# Altium schematic symbol library Components_3011.SchLib: 5 symbols
Pins are listed as number, name and electrical type; pins without a type are passive.

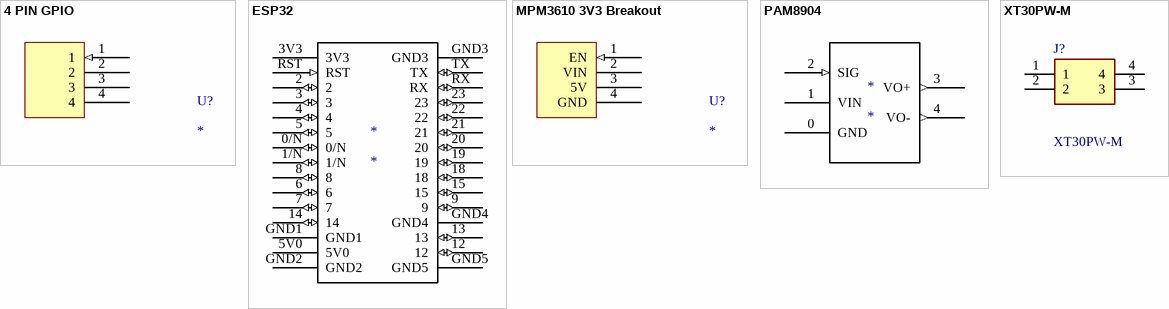
[diagram p0: symbols 4 PIN GPIO to XT30PW-M]

## 4 PIN GPIO
designator U?
footprint 4 PIN GPIO
pins: 1 (in) "EN", 2 (power) "Vin", 3 (power) "5V", 4 (power) "GND"

## ESP32
designator *
ESP32 Pinout
footprint ESP32
pins: 0/N (io), 1/N (io), 2 (io), 3 (io), 3V3, 4 (io), 5 (io), 5V0, 6 (io), 7 (io), 8 (io), 9 (io), 12 (io), 13 (io), 14 (io), 15 (io), 18 (io), 19 (io), 20 (io), 21 (io), 22 (io), 23 (io), GND1, GND2, GND3, GND4, GND5, RST (in), RX (io), TX (io)

## MPM3610 3V3 Breakout
designator U?
footprint ADA4683_MPM3610_BREAKOUT
pins: 1 EN (in), 2 VIN (power) "Vin", 3 5V (power), 4 GND (power)

## PAM8904
designator *
Adafruit PAM8904 Audio Amplifier
footprint Adafruit_PAM8904 (Audio Amplifier footprint)
pins: 0 GND (power), 1 VIN (power), 2 SIG (in), 3 VO+ (out), 4 VO- (out)

## XT30PW-M
designator J?
30A Low Temperature Rise Fire Retardant Plug; Manufacturer_Name: Amass; Manufacturer_Part_Number: XT30PW-M30.G.Y; Geometry.Height: 5mm; Mouser Part Number: *; Mouser Price/Stock: *; Arrow Part Number: *; Arrow Price/Stock: *; Datasheet Link: https://www.tme.eu/sl/Document/ce4077e36b79046da520ca73227e15de/XT30PW%20SPEC.pdf; JLCPCB Part #: C431092
footprint XT30
pins: 1, 2, 3, 4